# Altium footprint library zulu_a7.PcbLib: 16 footprints
Each footprint in its own frame and in the unit in brackets; x right, y up, seen from the top. Pads: shape width x height; smd on the part's side, far side on the other; paste and mask are expansions set on the pad; w line width, h text height; cw(c..) or ccw(c..) is an arc to the next point about the centre after c.
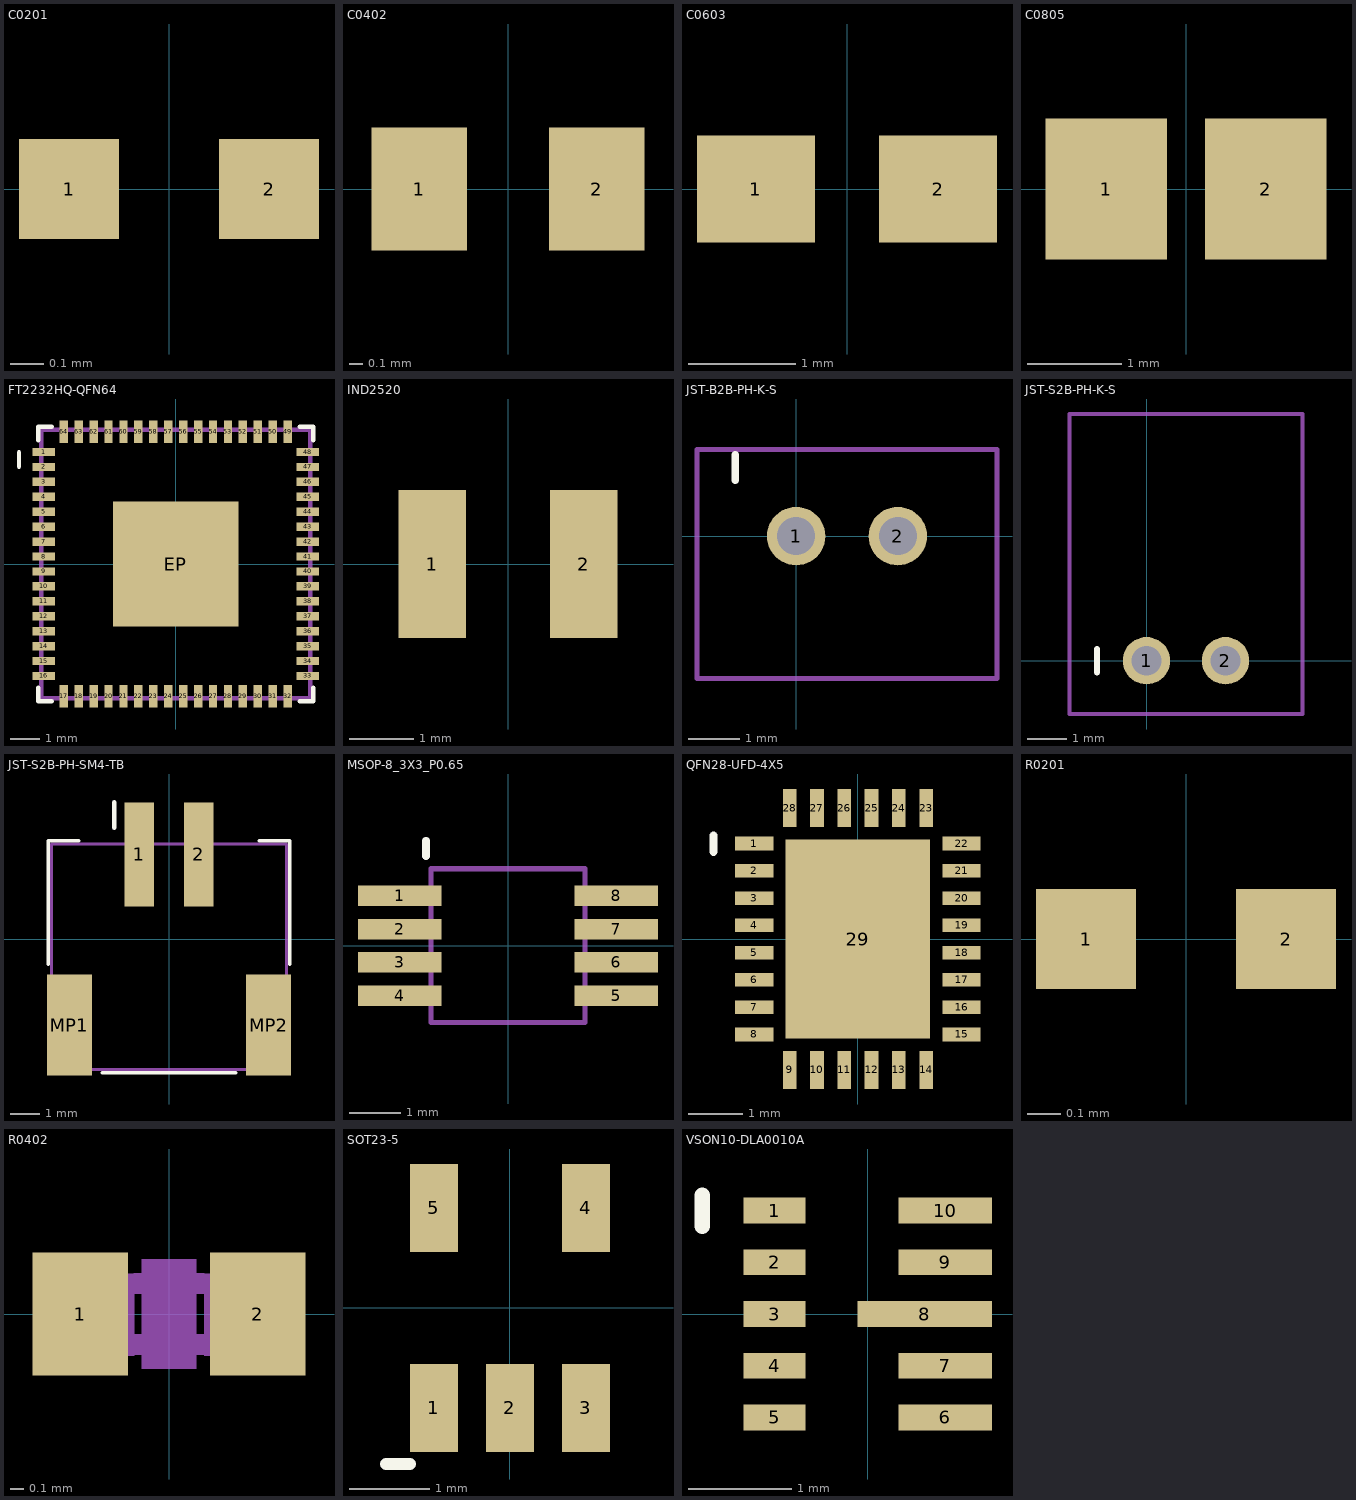
[diagram p0: the footprints below, top view; thin cyan lines are the x and y axes]

## C0201 [mm] "0201 capacitor, 0.30 x 0.30 pads on 0.60 pitch"
height 0.33
pads (2):
  rect 0.3x0.3 smd: 1(-0.3,0) 2(0.3,0)

## C0402 [mm] "0402 capacitor, 0.70 x 0.90 pads on 1.30 pitch"
height 0.55
pads (2):
  rect 0.7x0.9 smd: 1(-0.65,0) 2(0.65,0)

## C0603 [mm] "0603 capacitor, 1.10 x 1.00 pads on 1.70 pitch (as asar_feather.PcbLib)"
height 0.9
pads (2):
  rect 1.1x1 smd: 1(-0.85,0) 2(0.85,0)

## C0805 [mm] "0805 capacitor, 1.30 x 1.50 pads on 1.70 pitch (as asar_feather.PcbLib)"
height 1.25
pads (2):
  rect 1.3x1.5 smd: 1(-0.85,0) 2(0.85,0)

## FT2232HQ-QFN64 [mm] "FTDI FT2232HQ QFN-64 9x9 mm, 0.5 mm pitch, 4.20 mm exposed-pad land"
height 0.9
pads (65):
  rect 0.75x0.28 smd: 1(-4.425,3.75) 2(-4.425,3.25) 3(-4.425,2.75) 4(-4.425,2.25) 5(-4.425,1.75) 6(-4.425,1.25) 7(-4.425,0.75) 8(-4.425,0.25) 9(-4.425,-0.25) 10(-4.425,-0.75) 11(-4.425,-1.25) 12(-4.425,-1.75) 13(-4.425,-2.25) 14(-4.425,-2.75) 15(-4.425,-3.25) 16(-4.425,-3.75) 33(4.425,-3.75) 34(4.425,-3.25) 35(4.425,-2.75) 36(4.425,-2.25) 37(4.425,-1.75) 38(4.425,-1.25) 39(4.425,-0.75) 40(4.425,-0.25) 41(4.425,0.25) 42(4.425,0.75) 43(4.425,1.25) 44(4.425,1.75) 45(4.425,2.25) 46(4.425,2.75) 47(4.425,3.25) 48(4.425,3.75)
  rect 0.28x0.75 smd: 17(-3.75,-4.425) 18(-3.25,-4.425) 19(-2.75,-4.425) 20(-2.25,-4.425) 21(-1.75,-4.425) 22(-1.25,-4.425) 23(-0.75,-4.425) 24(-0.25,-4.425) 25(0.25,-4.425) 26(0.75,-4.425) 27(1.25,-4.425) 28(1.75,-4.425) 29(2.25,-4.425) 30(2.75,-4.425) 31(3.25,-4.425) 32(3.75,-4.425) 49(3.75,4.425) 50(3.25,4.425) 51(2.75,4.425) 52(2.25,4.425) 53(1.75,4.425) 54(1.25,4.425) 55(0.75,4.425) 56(0.25,4.425) 57(-0.25,4.425) 58(-0.75,4.425) 59(-1.25,4.425) 60(-1.75,4.425) 61(-2.25,4.425) 62(-2.75,4.425) 63(-3.25,4.425) 64(-3.75,4.425)
  rect 4.2x4.2 smd paste-4.2: EP(0,0)
Top Overlay:
  lines w0.15: -5.25,3.25 -5.25,3.75 ; -4.6,-4.15 -4.6,-4.6 -4.15,-4.6 ; -4.6,4.15 -4.6,4.6 -4.15,4.6 ; 4.15,-4.6 4.6,-4.6 4.6,-4.15 ; 4.15,4.6 4.6,4.6 4.6,4.15
Top Paste:
  rectangle: 0.75,0.75 1.75,1.75
  rectangle: 0.75,-0.5 1.75,0.5
  rectangle: 0.75,-1.75 1.75,-0.75
  rectangle: -0.5,0.75 0.5,1.75
  rectangle: -0.5,-0.5 0.5,0.5
  rectangle: -0.5,-1.75 0.5,-0.75
  rectangle: -1.75,0.75 -0.75,1.75
  rectangle: -1.75,-0.5 -0.75,0.5
  rectangle: -1.75,-1.75 -0.75,-0.75
Mechanical 3:
  lines w0.15: -4.5,-4.5 -4.5,4.5 4.5,4.5 4.5,-4.5 -4.5,-4.5

## IND2520 [mm] "2520 inductor (Murata DFE2520), 1.05 x 2.30 pads on 2.35 pitch"
height 1.2
pads (2):
  rect 1.05x2.3 smd: 1(-1.175,0) 2(1.175,0)

## JST-B2B-PH-K-S [mm] "JST PH 2.0 mm 2-pin vertical through-hole header B2B-PH-K-S; 0.75 mm holes, 1.30 mm lands; body 5.9 x 4.5 x 6.0"
height 6
pads (2):
  round 1.15 hole 0.75: 1(0,0) 2(2,0)
Top Overlay:
  lines w0.15: -1.2,1.1 -1.2,1.6
Mechanical 3:
  lines w0.1: -1.95,-2.8 3.95,-2.8 3.95,1.7 -1.95,1.7 -1.95,-2.8

## JST-S2B-PH-K-S [mm] "JST PH 2.0 mm 2-pin side-entry through-hole header S2B-PH-K-S; 0.75 mm holes, 1.20 mm lands; body 5.9 x 7.6 x 4.8, opening +y"
height 4.8
pads (2):
  round 1.2 hole 0.75: 1(0,0) 2(2,0)
Top Overlay:
  lines w0.15: -1.25,-0.3 -1.25,0.3
Mechanical 3:
  lines w0.1: -1.95,-1.35 -1.95,6.25 3.95,6.25 3.95,-1.35 -1.95,-1.35

## JST-S2B-PH-SM4-TB [mm] "JST PH 2.0 mm 2-pin side-entry SMT header S2B-PH-SM4-TB; validated stock land pattern"
height 4.5
pads (4):
  rect 1x3.5 smd: 1(-1,2.85) 2(1,2.85)
  rect 1.5x3.4 smd: MP1(-3.35,-2.9) MP2(3.35,-2.9)
Top Overlay:
  lines w0.12: -4.06,-0.85 -4.06,3.31 -3.04,3.31 ; -2.25,-4.51 2.25,-4.51 ; 3.04,3.31 4.06,3.31 4.06,-0.85
  lines w0.15: -1.85,3.75 -1.85,4.6
Mechanical 3:
  lines w0.1: -3.95,-4.4 -3.95,3.2 3.95,3.2 3.95,-4.4 -3.95,-4.4

## MSOP-8_3X3_P0.65 [mm] "MSOP-8 3 x 3 mm, 0.65 mm pitch (JEDEC MO-187 AA); pads 1.625 x 0.40 at +-2.1125; 93LC46BT-I/MS"
height 1.1
pads (8):
  rect 1.625x0.4 smd: 1(-2.113,0.975) 2(-2.113,0.325) 3(-2.113,-0.325) 4(-2.113,-0.975) 5(2.113,-0.975) 6(2.113,-0.325) 7(2.113,0.325) 8(2.113,0.975)
Top Overlay:
  lines w0.15: -1.6,1.75 -1.6,2.05
Mechanical 3:
  lines w0.1: -1.5,-1.5 1.5,-1.5 1.5,1.5 -1.5,1.5 -1.5,-1.5

## PCBComponent_1 [mm]

## QFN28-UFD-4X5 [mm] "UFD 28-lead QFN 4 x 5 mm, 0.5 pitch, exposed pad 2.65 x 3.65 (pad 29 = GND); LTC DWG 05-08-1712 Rev B recommended pads"
height 0.75
pads (29):
  rect 0.7x0.25 smd: 1(-1.9,1.75) 2(-1.9,1.25) 3(-1.9,0.75) 4(-1.9,0.25) 5(-1.9,-0.25) 6(-1.9,-0.75) 7(-1.9,-1.25) 8(-1.9,-1.75) 15(1.9,-1.75) 16(1.9,-1.25) 17(1.9,-0.75) 18(1.9,-0.25) 19(1.9,0.25) 20(1.9,0.75) 21(1.9,1.25) 22(1.9,1.75)
  rect 0.25x0.7 smd: 9(-1.25,-2.4) 10(-0.75,-2.4) 11(-0.25,-2.4) 12(0.25,-2.4) 13(0.75,-2.4) 14(1.25,-2.4) 23(1.25,2.4) 24(0.75,2.4) 25(0.25,2.4) 26(-0.25,2.4) 27(-0.75,2.4) 28(-1.25,2.4)
  rect 2.65x3.65 smd: 29(0,0)
Top Overlay:
  lines w0.15: -2.65,1.6 -2.65,1.9

## R0201 [mm] "0201 resistor, 0.30 x 0.30 pads on 0.60 pitch"
height 0.26
pads (2):
  rect 0.3x0.3 smd: 1(-0.3,0) 2(0.3,0)

## R0402 [mm] "R0402"
pads (2):
  rect 0.7x0.9 smd: 1(-0.65,0) 2(0.65,0)
Mechanical 4:
  region: -0.554,-0.305 -0.554,0.295 -0.254,0.295 -0.254,-0.305
  region: 0.259,-0.305 0.259,0.295 0.559,0.295 0.559,-0.305
  lines w0.152: -0.245,-0.224 0.245,-0.224 ; -0.245,0.224 0.245,0.224
Bottom Glue Points:
  region: -0.2,-0.4 -0.2,0.4 0.2,0.4 0.2,-0.4

## SOT23-5 [mm] "SOT23-5 (Semtech SC189xSKTRT land, datasheet p.23): 0.95 pitch, pads 0.60 x 1.10, rows 2.50 apart; pins 1-3 one side, 4 opposite 3, 5 opposite 1 (as asar_feather.PcbLib)"
height 1.45
pads (5):
  rect 0.6x1.1 smd: 1(-0.95,-1.25) 2(0,-1.25) 3(0.95,-1.25) 4(0.95,1.25) 5(-0.95,1.25)
Top Overlay:
  lines w0.15: -1.55,-1.95 -1.25,-1.95

## VSON10-DLA0010A [mm] "TI VSON-HR 10 (DLA0010A) 2.0 x 3.0 mm 0.5 pitch, TPS63802; TI land pattern 4223750/D"
height 1
pads (10):
  rect 0.6x0.25 smd: 1(-0.9,1) 2(-0.9,0.5) 3(-0.9,0) 4(-0.9,-0.5) 5(-0.9,-1)
  rect 0.9x0.25 smd: 6(0.75,-1) 7(0.75,-0.5) 9(0.75,0.5) 10(0.75,1)
  rect 1.3x0.25 smd: 8(0.55,0)
Top Overlay:
  lines w0.15: -1.6,0.85 -1.6,1.15